# EAGLE library part USBLC6 (library orb)
ST USBLC6-2SC6 USB ESD protection (SOT-23-6)
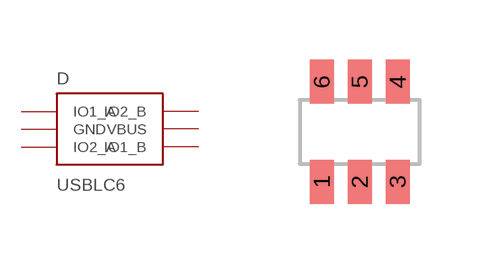
[diagram p7: symbol with the pads of SOT23_6; footprint SOT23_6]

Designator prefix D

## USBLC6  [SOT23_6]
1  IO1_A  pas
2  GND  pas
3  IO2_A  pas
4  IO2_B  pas
5  VBUS  pas
6  IO1_B  pas

## Footprint SOT23_6 (pad centres in mm)
SOT-23-6, 0.95 mm pitch (JEDEC MO-178), generic land pattern
smd 0.6 x 1.1: 1 -0.95,-1.25; 2 0,-1.25; 3 0.95,-1.25; 4 0.95,1.25; 5 0,1.25; 6 -0.95,1.25